# Altium schematic symbol library BAS40W-7-F.SchLib: 1 symbol
Pins are listed as number, name and electrical type; pins without a type are passive.

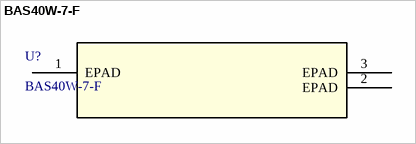
[diagram p0: symbol BAS40W-7-F]

## BAS40W-7-F
designator U?
No Description Available; Manufacturer_Name: Diodes Inc; Copyright: Copyright (C) 2026 Ultra Librarian. All rights reserved.; Manufacturer_Part_Number: BAS40W-7-F; RefDes: RefDes; Type: Type
footprint SOT-323_DIO
pins: 1 EPAD, 2 EPAD, 3 EPAD